# Altium schematic symbol library 光耦.SCHLIB: 1 symbol
Pins are listed as number, name and electrical type; pins without a type are passive.

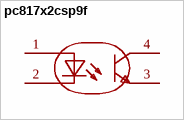
[diagram p0: symbol pc817x2csp9f]

## pc817x2csp9f
designator U??  (value not drawn)
输入类型:DC;正向压降(Vf):1.2V;输出电流:50mA;隔离电压(Vrms):5kV;直流反向耐压(Vr):6V;负载电压:80V;输出通道数:-;集射极饱和电压(VCE(sat)):200mV@20mA,1mA;; Manufacturer: SHARP(夏普); AddInBom: yes; ModelId: 991879f0d3e24dbd9895164815fb95aa; ModelName: SMD-4_L4.6-W6.5-H3.7-LS10.2-P2.54; ModelTransform: 401.94494,181.102,0,0,0,0,0,0.003,0; Input type: DC; Output Type: 光电三极管; Voltage - Forward(Vf): 1.2V; Output Current: 50mA; Isolation Voltage(Vrms): 5kV; Reverse Voltage: 6V; Load Voltage: 80V; Rise time: 4us; Fall time: 3us; Current Transfer Ratio (CTR) Minimum: 50%; Current Transfer Ratio (CTR) Maximum/Saturation Value: 600%; Total Power Dissipation(Pd): 200mW; Symbol: PC817X2CSP9F; LCSC Part Name: DC输入 隔离电压(rms):5000V; SupplierPart: C66405; ManufacturerPart: PC817X2CSP9F; Supplier Footprint: SMD-4P; JLCPCB Part Class: Extended Part; Datasheet: https://item.szlcsc.com/datasheet/PC817X2CSP9F/67489.html; Supplier: LCSC; ConvertToPcb: yes; FootprintName: SMD-4_L4.6-W6.5-P2.54-LS10.2-TL; Number of Outputs: -; Vce Saturation(VCE(sat)): 200mV@20mA,1mA; Operating Temperature: -30℃~+100℃; Forward Current(If): 50mA
footprint SMD-4_L4.6-W6.5-P2.54-LS10.2-TL
pins: 1, 2, 3, 4